# Altium footprint library Propia.PcbLib: 378 footprints (part 24 of 24)
Each footprint in its own frame and in the unit in brackets; x right, y up, seen from the top. Pads: shape width x height; smd on the part's side, far side on the other; paste and mask are expansions set on the pad; w line width, h text height; cw(c..) or ccw(c..) is an arc to the next point about the centre after c.
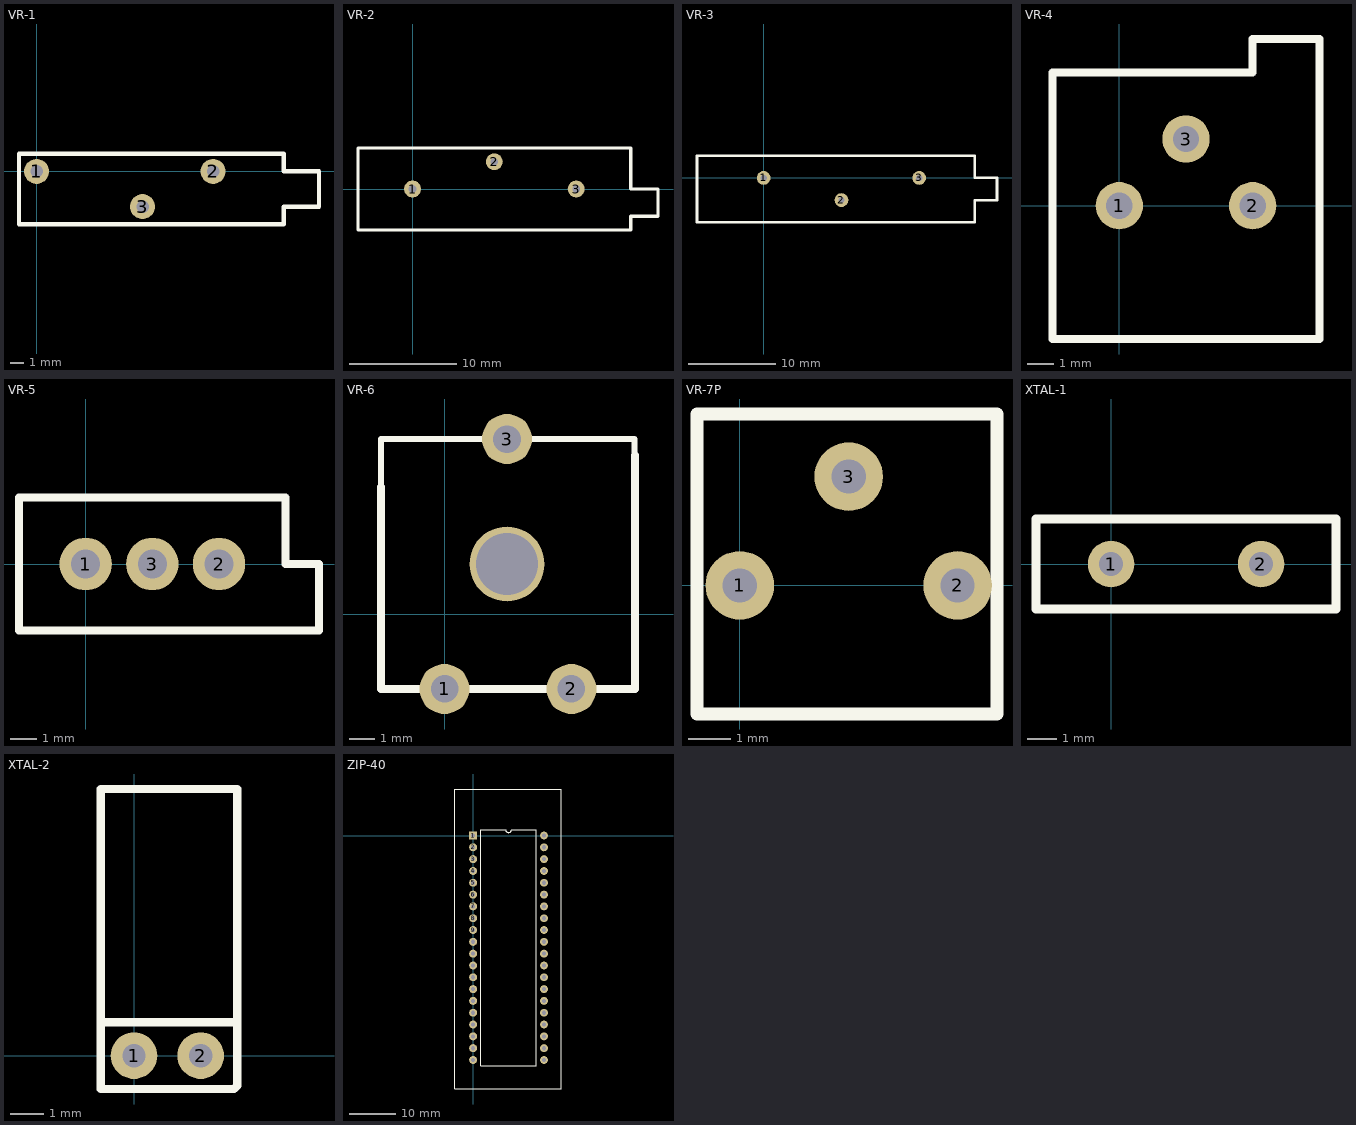
[diagram p23: the footprints below, top view; thin cyan lines are the x and y axes]

## VR-1 [mm]
pads (3):
  round 1.8 hole 0.9: 1(0,0) 2(12.7,0) 3(7.62,-2.54)
TopOverlay:
  lines w0.305: -1.27,-3.81 17.78,-3.81 17.78,-2.54 20.32,-2.54 20.32,0 17.78,0 17.78,1.27 -1.27,1.27 -1.27,-3.81

## VR-2 [mil]
pads (3):
  round 62 hole 28: 1(0,0) 2(300,100) 3(600,0)
TopOverlay:
  lines w12: -200,-150 -200,150 800,150 800,0 900,0 900,-100 800,-100 800,-150 -200,-150

## VR-3 [mil]
pads (3):
  round 62 hole 28: 1(0,0) 2(350,-100) 3(700,0)
TopOverlay:
  lines w12: -300,-200 950,-200 950,-100 1050,-100 1050,0 950,0 950,100 -300,100 -300,-200

## VR-4 [mm]
pads (3):
  round 1.8 hole 1: 1(0,0) 2(5.08,0) 3(2.54,2.54)
TopOverlay:
  lines w0.305: -2.54,-5.08 -2.54,5.08 5.08,5.08 5.08,6.35 7.62,6.35 7.62,-5.08 -2.54,-5.08

## VR-5 [mm]
pads (3):
  round 2 hole 1.1: 1(0,0) 2(5.08,0) 3(2.54,0)
TopOverlay:
  lines w0.305: -2.54,-2.54 -2.54,2.54 7.62,2.54 7.62,0 8.89,0 8.89,-2.54 -2.54,-2.54

## VR-6 [mm]
pads (4):
  round 2 hole 1.1: 1(0,-3) 2(5.08,-3) 3(2.5,7)
  round 3 hole 2.5: ""(2.5,2)
TopOverlay:
  lines w0.254: -2.54,5.08 -2.54,7 7.6,7 7.6,6.33 7.61,6.32
  lines w0.305: -2.54,5.08 -2.54,-3 7.62,-3 7.62,6.35

## VR-7P [mm]
pads (3):
  round 1.6 hole 0.8: 1(0,0) 2(5.08,0) 3(2.54,2.54)
TopOverlay:
  lines w0.305: -1,-3 -1,4 6,4 6,-3 -1,-3

## XTAL-1 [mil]
pads (2):
  round 62 hole 31.5: 1(0,0) 2(200,0)
TopOverlay:
  lines w12: -100,-60 -100,60 300,60 300,-60 -100,-60

## XTAL-2 [mm]
pads (2):
  round 1.4 hole 0.7: 1(0,0) 2(2,0)
TopOverlay:
  lines w0.254: -1,1 3,1 ; -1,-1 -1,8 3.1,8 3.1,-0.9 3,-1 -1,-1

## ZIP-40 [mm]
pads (40):
  rect 1.7x1.7 hole 0.9: 1(0,0)
  round 1.7 hole 0.9: 2(0,-2.54) 3(0,-5.08) 4(0,-7.62) 5(0,-10.16) 6(0,-12.7) 7(0,-15.24) 8(0,-17.78) 9(0,-20.32) 10(0,-22.86) 11(0,-25.4) 12(0,-27.94) 13(0,-30.48) 14(0,-33.02) 15(0,-35.56) 16(0,-38.1) 17(0,-40.64) 18(0,-43.18) 19(0,-45.72) 20(0,-48.26) 21(15.24,-48.26) 22(15.24,-45.72) 23(15.24,-43.18) 24(15.24,-40.64) 25(15.24,-38.1) 26(15.24,-35.56) 27(15.24,-33.02) 28(15.24,-30.48) 29(15.24,-27.94) 30(15.24,-25.4) 31(15.24,-22.86) 32(15.24,-20.32) 33(15.24,-17.78) 34(15.24,-15.24) 35(15.24,-12.7) 36(15.24,-10.16) 37(15.24,-7.62) 38(15.24,-5.08) 39(15.24,-2.54) 40(15.24,0)
TopOverlay:
  lines w0.2: 1.685,-49.53 1.685,1.27 6.985,1.27 ccw(c7.62,1.27) 8.255,1.27 13.555,1.27 13.555,-49.53 1.685,-49.53
  lines w0.254: -4,-54.5 -4,10 19,10 19,-54.5 -4,-54.5